# Altium schematic symbol library Schlib1.SchLib: 3 symbols
Pins are listed as number, name and electrical type; pins without a type are passive.

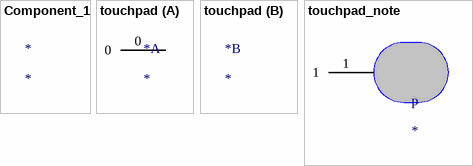
[diagram p0: symbols Component_1 to touchpad_note]

## Component_1
designator *

## touchpad
designator *
part A pins: 0

## touchpad_note
designator p
pins: 1